# Altium schematic symbol library Headers.SchLib: 126 symbols (part 2 of 2)
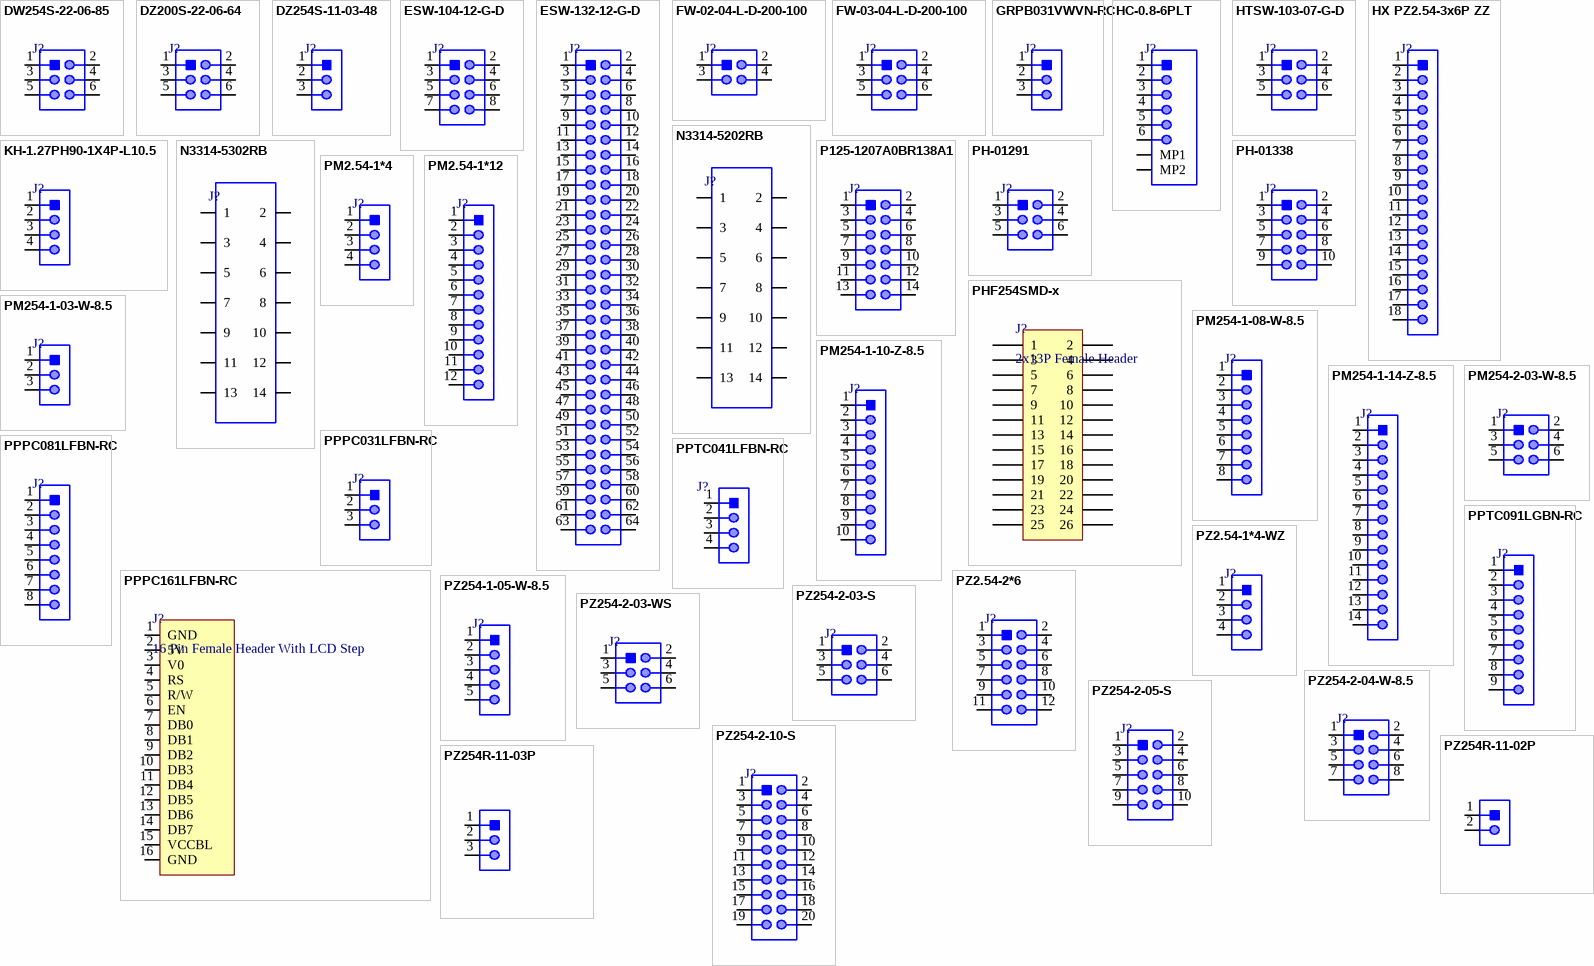
[diagram p4: symbols DW254S-22-06-85 to PZ254R-11-03P]

## PHF254SMD-x
designator J?, comment 2x13P Female Header
P=2.54mm Female Headers,SMD,ROHS; Manufacturer: RTLECS; Manufacturer Part Number: PHF254SMD-x; Value: Custom; Package: Custom; ComponentLink1Description: Aliexpress; ComponentLink1URL: https://vi.aliexpress.com/i/32798959899.html?gatewayAdapt=glo2vnm; Item Type: Header
footprint PHF254SMD-x_
pins: 1, 2, 3, 4, 5, 6, 7, 8, 9, 10, 11, 12, 13, 14, 15, 16, 17, 18, 19, 20, 21, 22, 23, 24, 25, 26

## PM2.54-1*4
designator J?
2mm 2.54mm Plugin 2.5A -40℃~+105℃ Straight 1x4P Top 8.5mm 4 Square Hole Plugin,P=2.54mm Female Headers ROHS; Manufacturer: ZHOURI; Manufacturer Part Number: PM2.54-1*4; Package: Plugin,P=2.54mm; LCSC Part Number: C5116530; Item Type: Female Header; ComponentLink1Description: LCSC; ComponentLink1URL: https://www.lcsc.com/product-detail/span-style-background-color-ff0-Female-span-Headers_ZHOURI-PM2-54-1-4_C5116530.html
footprint HDR1X4 Female
pins: 1, 2, 3, 4

## PM2.54-1*12
designator J?
2.54mm 2.54mm Plugin 2.5A 12P -40℃~+105℃ Straight 1x12P Top 8.5mm Square Hole Plugin,P=2.54mm Female Headers ROHS; Manufacturer: ZHOURI; Manufacturer Part Number: PM2.54-1*12; Package: Plugin,P=2.54mm; LCSC Part Number: C5224029; Item Type: Female Header; ComponentLink1Description: LCSC; ComponentLink1URL: https://www.lcsc.com/product-detail/span-style-background-color-ff0-Female-span-Headers_ZHOURI-PM2-54-1-12_C5224029.html
footprint HDR 1x12 TH (Female)
pins: 1, 2, 3, 4, 5, 6, 7, 8, 9, 10, 11, 12

## PM254-1-03-W-8.5
designator J?
2.54mm Plugin 3A Copper Alloy 3P -40℃~+105℃ 260℃@5S Right-Angle 1x3P side 8.5mm Square Holes Push-Pull,P=2.54mm Female Headers ROHS; Manufacturer: HCTL; Manufacturer Part Number: PM254-1-03-W-8.5; Package: Push-Pull,P=2.54mm; LCSC Part Number: C2897385; Item Type: Female Header; ComponentLink1Description: LCSC; ComponentLink1URL: *
footprint HDR 1x3 Female Right angle (2.54mm)
pins: 1, 2, 3

## PM254-1-08-W-8.5
designator J?
2.54mm Single Row 3A Copper Alloy 8P -40℃~+105℃ 260℃@5S Bend insert 1x8P Side 8.5mm Square Hole Push-Pull,P=2.54mm Female Headers ROHS; Manufacturer: HCTL; Manufacturer Part Number: PM254-1-08-W-8.5; Package: Push-Pull,P=2.54mm; LCSC Part Number: C2897390; Item Type: Headers; ComponentLink1Description: LCSC; ComponentLink1URL: https://www.lcsc.com/product-detail/Female-Headers_HCTL-PM254-1-08-W-8-5_C2897390.html
footprint PM254-1-08-W-8.5
pins: 1, 2, 3, 4, 5, 6, 7, 8

## PM254-1-10-Z-8.5
designator J?
2.54mm Single Row 3A Copper alloy 10P -40℃~+105℃ Direct Insert 1x10P 8.5mm Top Square Hole Plugin,P=2.54mm Female Headers ROHS; Manufacturer: HCTL; Manufacturer Part Number: PM254-1-10-Z-8.5; Package: Plugin,P=2.54mm; LCSC Part Number: C2897373; Item Type: Female Header; ComponentLink1Description: LCSC; ComponentLink1URL: https://www.lcsc.com/product-detail/Female-Headers_HCTL-PM254-1-10-Z-8-5_C2897373.html
footprint PM254-1-10-Z-8.5
pins: 1, 2, 3, 4, 5, 6, 7, 8, 9, 10

## PM254-1-14-Z-8.5
designator J?
2.54mm Single Row 3A Brass Alloy 14P -40℃~+105℃ 260℃@5S Direct Insert 1x14P 8.5mm Top Square Hole Plugin,P=2.54mm Female Headers ROHS; Manufacturer: HCTL; Manufacturer Part Number: PM254-1-14-Z-8.5; Package: Plugin,P=2.54mm; LCSC Part Number: C2897377; Item Type: Female Header; ComponentLink1Description: LCSC; ComponentLink1URL: https://www.lcsc.com/product-detail/Female-Headers_HCTL-PM254-1-14-Z-8-5_C2897377.html
footprint HDR 1x14 TH (Female)
pins: 1, 2, 3, 4, 5, 6, 7, 8, 9, 10, 11, 12, 13, 14

## PM254-2-03-W-8.5
designator J?
2.54mm 2.54mm 双排 3A Copper Alloy 6P -40℃~+105℃ 260℃@5S Right-Angle 2x3P side 8.5mm Square Holes Push-Pull,P=2.54mm Female Headers ROHS; Manufacturer: HCTL; Manufacturer Part Number: PM254-2-03-W-8.5; Package: Push-Pull,P=2.54mm; LCSC Part Number: C2897423; Item Type: Female Header; ComponentLink1Description: LCSC; ComponentLink1URL: https://www.lcsc.com/product-detail/Female-Headers_HCTL-PM254-2-03-W-8-5_C2897423.html
footprint HDR 2x3 right angle Female (2.54mm)
pins: 1, 2, 3, 4, 5, 6

## PPPC031LFBN-RC
designator J?
CONN HDR 3POS 0.1 GOLD PCB; Manufacturer: Sullins; Manufacturer Part Number: PPPC031LFBN-RC; Item Type: Connectors; Supplier: Digikey; Supplier Part Number: S7036-ND; RoHS: Yes; Stock: 27967; Pricing: 1=0.38, 10=0.33, 100=0.2721, 500=0.2366, 1000=0.1952, 5000=0.17154, 10000=0.169 (USD); ComponentLink1URL: https://media.digikey.com/pdf/Data%20Sheets/Sullins%20PDFs/Female_Headers.100_DS.pdf?src-supplier=Digikey; ComponentLink1Description: https://media.digikey.com/pdf/Data%20Sheets/Sullins%20PDFs/Female_Headers.100_DS.pdf?src-supplier=Digikey; ComponentLink2URL: http://www.sullinscorp.com/catalogs/78_Page80-81_HEADER_.100_2.54mm_FEMALE.pdf?src-supplier=Future+Electronics; ComponentLink2Description: http://www.sullinscorp.com/catalogs/78_Page80-81_HEADER_.100_2.54mm_FEMALE.pdf?src-supplier=Future+Electronics; ComponentLink3URL: https://datasheet.octopart.com/PPPC031LFBN-RC-Sullins-datasheet-41308905.pdf?src-supplier=Future+Electronics; ComponentLink3Description: https://datasheet.octopart.com/PPPC031LFBN-RC-Sullins-datasheet-41308905.pdf?src-supplier=Future+Electronics
footprint HDR1X3 (Female)
pins: 1, 2, 3

## PPPC081LFBN-RC
designator J?
CONN HDR 8POS 0.1 GOLD PCB; Manufacturer: Sullins; Manufacturer Part Number: PPPC081LFBN-RC; Item Type: Connectors; Number of Positions: 8; Connector Type: Header; Voltage Rating: 250V; Supplier: Digikey; Supplier Part Number: S7041-ND; RoHS: Yes; Stock: 34437; Pricing: 1=0.68, 10=0.594, 80=0.48975, 440=0.42589, 1000=0.35135, 5000=0.30876, 10000=0.3042 (USD); Mounting Technology: Through Hole; Contact Material: Bronze; Housing Material: Plastic; Contact Finish - Mating: GOLD; Insulation Color: Black; Insulation Material: Polyester; Contact Shape: Square; Min Operating Temperature: -40°C; Max Operating Temperature: 105°C; Number of Rows: 1; Packaging: Bulk; Termination: Solder; Contact Type: Female Socket; Fastening Type: Pull; Series: -; Length: 20.8mm; Width: 2.5mm; Height: 8.5mm; Lead Free: Lead Free; RoHS Compliant: Yes; Flammability Rating: UL94 V-0; ComponentLink1URL: https://media.digikey.com/pdf/Data%20Sheets/Sullins%20PDFs/Female_Headers.100_DS.pdf?src-supplier=Digikey; ComponentLink1Description: https://media.digikey.com/pdf/Data%20Sheets/Sullins%20PDFs/Female_Headers.100_DS.pdf?src-supplier=Digikey; ComponentLink2URL: http://www.sullinscorp.com/catalogs/101_Page80-81_HEADER_.100_2.54mm_FEMALE.pdf?src-supplier=Future+Electronics; ComponentLink2Description: http://www.sullinscorp.com/catalogs/101_Page80-81_HEADER_.100_2.54mm_FEMALE.pdf?src-supplier=Future+Electronics
footprint HDR1X8 Female (Connector; Header; 8 Position)
pins: 1, 2, 3, 4, 5, 6, 7, 8

## PPPC161LFBN-RC
designator J?, comment 16 Pin Female Header With LCD Step
CONN HDR 16POS 0.1 GOLD PCB; Manufacturer: Sullins; Manufacturer Part Number: PPPC161LFBN-RC; Number of Positions: 16; Connector Type: Header,Socket; Pitch: 0.1inch; Supplier 1: Digi-Key; Stock 1: 6865; Pricing 1: 1=1.02, 10=0.897, 100=0.7742, 500=0.63342, 1000=0.56304, 5000=0.5083 (USD); Mount: Through Hole; Color: Black; Contact Plating: Gold; Contact Material: Bronze; Housing Material: Plastic; Package Quantity: 1000; Number of Rows: 1; Packaging: Bulk; Termination: Solder; Length: 41.1mm; Height: 8.5mm; Width: 2.5mm; Lead Free: Lead Free; Supplier Part Number 1: S7049-ND; LCSC Part Number: C3322257; ComponentLink1Description: LCSC; ComponentLink1URL: https://www.lcsc.com/product-detail/Female-Headers_Sullins-Connector-Solutions-PPPC161LFBN-RC_C3322257.html
footprint PPPC161LFBN-RC_ (CONN HDR 16POS 0.1 GOLD PCB)
pins: 1 GND, 2 5V, 3 V0, 4 RS, 5 R/W, 6 EN, 7 DB0, 8 DB1, 9 DB2, 10 DB3, 11 DB4, 12 DB5, 13 DB6, 14 DB7, 15 VCCBL, 16 GND

## PPTC041LFBN-RC
designator J?
CONN HEADER FEMALE 4POS .1 TIN; Manufacturer: Sullins; Manufacturer Part Number: PPTC041LFBN-RC; Number of Positions: 4; Voltage Rating: 250V; Pitch: 2.54mm; Supplier 1: Future Electronics; RoHS: Yes; Category: Connectors; Stock 1: 915; Pricing 1: 1=0.28500, 150=0.27500, 400=0.26500, 1500=0.25500, 4000=0.23500 (USD); Mounting Technology: Through Hole; Contact Material: Bronze; Housing Material: Plastic; Contact Finish - Mating: TIN; Insulation Color: Black; Insulation Material: Polyester; Contact Shape: Square; Min Operating Temperature: -40°C; Max Operating Temperature: 105°C; Number of Rows: 1; Packaging: Tray; Termination: Solder; Connector Type: Header; Contact Type: Female Socket; Fastening Type: Pull; Series: -; Length: 10.7mm; Width: 2.5mm; Height: 8.5mm; Lead Free: Lead Free; RoHS Compliant: Yes; Flammability Rating: UL94 V-0; ComponentLink1URL: https://media.digikey.com/pdf/Data%20Sheets/Sullins%20PDFs/Female_Headers.100_DS.pdf?src-supplier=Digi-Key; ComponentLink1Description: https://media.digikey.com/pdf/Data%20Sheets/Sullins%20PDFs/Female_Headers.100_DS.pdf?src-supplier=Digi-Key; ComponentLink2URL: http://www.sullinscorp.com/catalogs/78_Page80-81_HEADER_.100_2.54mm_FEMALE.pdf?src-supplier=Future+Electronics; ComponentLink2Description: http://www.sullinscorp.com/catalogs/78_Page80-81_HEADER_.100_2.54mm_FEMALE.pdf?src-supplier=Future+Electronics; Supplier Part Number 1: 7137813; LCSC Part Number: C3319639; Item Type: Header
footprint HDR1X4 Female
pins: 1, 2, 3, 4

## PPTC091LGBN-RC
designator J?
CONN HDR 9POS 0.1 TIN PCB R/A; Manufacturer: Sullins; Manufacturer Part Number: PPTC091LGBN-RC; Number of Positions: 9; Connector Type: Header; Voltage Rating: 250V; Item Type: Female Header R/A; Supplier: Digikey; Supplier Part Number: S5445-ND; RoHS: Yes; Category: Headers and Wire Housings; Stock: 254; Pricing: 1=0.74, 10=0.624, 80=0.5605, 440=0.45864, 1000=0.40768, 5000=0.364 (USD); Mounting Technology: Through Hole; Contact Material: Bronze; Housing Color: Black; Housing Material: Plastic; Contact Finish - Mating: TIN; Insulation Color: Black; Insulation Material: Polyester; Contact Shape: Square; Min Operating Temperature: -40°C; Max Operating Temperature: 105°C; Number of Rows: 1; Packaging: Tray; Termination: Solder; Contact Type: Female Socket; Fastening Type: Pull; Series: -; Length: 23.4mm; Width: 8.5mm; Height: 2.4mm; Lead Free: Lead Free; RoHS Compliant: Yes; Flammability Rating: UL94 V-0; ComponentLink1URL: https://media.digikey.com/pdf/Data%20Sheets/Sullins%20PDFs/Female_Headers.100_DS.pdf?src-supplier=Digikey; ComponentLink1Description: https://media.digikey.com/pdf/Data%20Sheets/Sullins%20PDFs/Female_Headers.100_DS.pdf?src-supplier=Digikey
footprint HDR 1x9 Female R/A
pins: 1, 2, 3, 4, 5, 6, 7, 8, 9

## PZ2.54-1*4-WZ
designator J?
Gold Right-Angle 4P 2.54mm Plugin 1x4P Push-Pull,P=2.54mm Pin Headers ROHS; Manufacturer: ZHOURI; Manufacturer Part Number: PZ2.54-1*4-WZ; Item Type: Header; Package: Push-Pull,P=2.54mm; LCSC Part Number: C5224015; ComponentLink1Description: LCSC; ComponentLink1URL: https://www.lcsc.com/product-detail/Pin-Headers_ZHOURI-PZ2-54-1-4-WZ_C5224015.html
footprint PZ2.54-1*4-WZ
pins: 1, 2, 3, 4

## PZ2.54-2*6
designator J?
Gold Straight 12P 2.54mm 双排 2x6P Plugin,P=2.54mm Pin Headers ROHS; Manufacturer: ZHOURI; Manufacturer Part Number: PZ2.54-2*6; Item Type: Header; Package: Plugin,P=2.54mm; LCSC Part Number: C5224012; ComponentLink1Description: LCSC; ComponentLink1URL: https://www.lcsc.com/product-detail/span-style-background-color-ff0-Pin-span-Headers_ZHOURI-PZ2-54-2-6_C5224012.html
footprint HDR 2x6 Straight (2.54mm)
pins: 1, 2, 3, 4, 5, 6, 7, 8, 9, 10, 11, 12

## PZ254-1-05-W-8.5
designator J?
3A Right-Angle Square Pins 2.5mm 260℃@10S 5P 6mm -40℃~+105℃ 2.54mm Plugin Black 1x5P Push-Pull,P=2.54mm Pin Headers ROHS; Manufacturer: HCTL; Manufacturer Part Number: PZ254-1-05-W-8.5; Package: Push-Pull,P=2.54mm; LCSC Part Number: C2894947; Item Type: Pin Headers; ComponentLink1Description: LCSC; ComponentLink1URL: https://www.lcsc.com/product-detail/Pin-Headers_HCTL-PZ254-1-05-W-8-5_C2894947.html
footprint HDR1X5 (R\A) (Connector; Header; 5 Position)
pins: 1, 2, 3, 4, 5

## PZ254-2-03-S
designator J?
250V 3A Standing paste Policy 2.5mm 6mm 6P -40℃~+105℃ 2.54mm Double Row Black 2.54mm 2x3P SMD,P=2.54mm Pin Headers ROHS; Manufacturer: HCTL; Manufacturer Part Number: PZ254-2-03-S; Item Type: Header; Package: SMD,P=2.54mm; LCSC Part Number: C3294461; ComponentLink1Description: LCSC; ComponentLink1URL: https://www.lcsc.com/product-detail/Pin-Headers_HCTL-PZ254-2-03-S_C3294461.html
footprint HDR 2x3 Male SMD 2.54mm
pins: 1, 2, 3, 4, 5, 6

## PZ254-2-03-WS
designator J?
3A Surface Mount，Right Angle Square Pins 2.5mm 260℃@10S 6mm 6P -40℃~+105℃ 2.54mm 双排 Black 2.54mm 2x3P SMD,P=2.54mm Pin Headers ROHS; Manufacturer: HCTL; Manufacturer Part Number: PZ254-2-03-WS; Item Type: Header; Package: SMD,P=2.54mm; LCSC Part Number: C5149353; ComponentLink1Description: LCSC; ComponentLink1URL: https://www.lcsc.com/product-detail/Pin-Headers_HCTL-PZ254-2-03-WS_C5149353.html
footprint PZ254-2-03-WS
pins: 1, 2, 3, 4, 5, 6

## PZ254-2-04-W-8.5
designator J?
3A Right-Angle Square Pins 2.5mm 260℃@10S 8P 6mm -40℃~+105℃ 2.54mm 双排 Black 2.54mm 2x4P Push-Pull,P=2.54mm Pin Headers ROHS; Manufacturer: HCTL; Manufacturer Part Number: PZ254-2-04-W-8.5; LCSC Part No: C2894984; ComponentLink1URL: https://www.lcsc.com/product-detail/Pin-Headers_HCTL-PZ254-2-04-W-8-5_C2894984.html; ComponentLink1Description: LCSC; Item Type: Push-Pull,P=2.54mm
footprint PZ254-2-04-W-8.5.
pins: 1, 2, 3, 4, 5, 6, 7, 8

## PZ254-2-05-S
designator J?
250V 3A Brick nogging Square Pins 2.5mm 260℃@5S 6mm 10P -40℃~+105℃ 2.54mm 双排 Black 2.54mm 2x5P SMD,P=2.54mm Pin Headers ROHS; Manufacturer: HCTL; Manufacturer Part Number: PZ254-2-05-S; Item Type: Male Header; LCSC Part Number: C3294463
footprint PZ254-2-05-S
pins: 1, 2, 3, 4, 5, 6, 7, 8, 9, 10

## PZ254-2-10-S
designator J?
250V 3A Brick nogging Square Pins 2.5mm 260℃@5S 6mm 20P -40℃~+105℃ 2.54mm 双排 Black 2.54mm 2x10P SMD,P=2.54mm Pin Headers ROHS; Manufacturer: HCTL; Manufacturer Part Number: PZ254-2-10-S; Item Type: Male Header; LCSC Part Number: C3294468
footprint PZ254-2-10-S
pins: 1, 2, 3, 4, 5, 6, 7, 8, 9, 10, 11, 12, 13, 14, 15, 16, 17, 18, 19, 20

## PZ254R-11-02P
designator J?
Right-Angle Square Pins 2.5mm 2P 6mm -40℃~+105℃ 2.54mm Plugin Black Brass 1x2P Push-Pull,P=2.54mm Pin Headers ROHS; Manufacturer: XFCN; Manufacturer Part Number: PZ254R-11-02P; Item Type: R/A Male Header; Package: Push-Pull,P=2.54mm; LCSC Part Number: C492410; ComponentLink1Description: LCSC; ComponentLink1URL: https://www.lcsc.com/product-detail/Pin-Headers_XFCN-PZ254R-11-02P_C492410.html
footprint HDR1X2 (R/A Male) (CONN HEADER VERT 2POS 2.54MM)
pins: 1, 2

## PZ254R-11-03P
designator J?
Right-Angle Square Pins 2.5mm 3P 6mm -40℃~+105℃ 2.54mm Plugin Black Brass 1x3P Push-Pull,P=2.54mm Pin Headers ROHS; Manufacturer: XFCN; Manufacturer Part Number: PZ254R-11-03P; Item Type: R/A Male Header; Package: Push-Pull,P=2.54mm; LCSC Part Number: C492411; ComponentLink1Description: LCSC; ComponentLink1URL: https://www.lcsc.com/product-detail/Pin-Headers_XFCN-PZ254R-11-03P_C492411.html
footprint HDR1X3 (R/A Male) (Connector; Header; 3 Position)
pins: 1, 2, 3

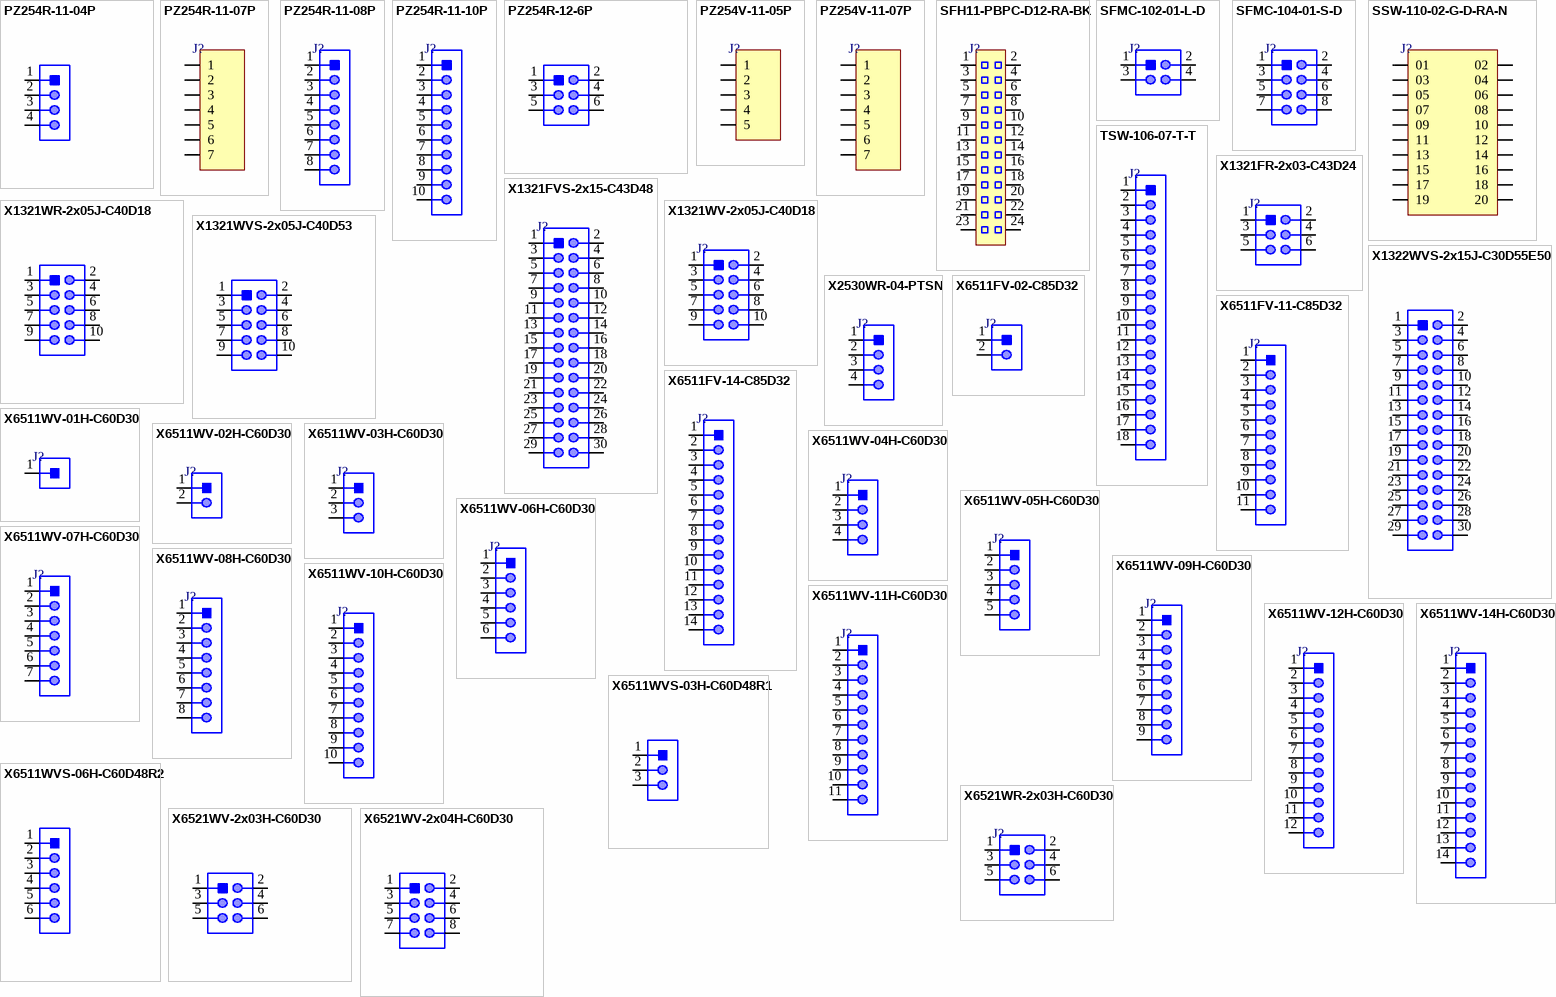
[diagram p2: symbols PZ254R-11-04P to X6521WV-2x04H-C60D30]

## PZ254R-11-04P
designator J?
Right-Angle Square Pins 2.5mm 4P 6mm -40℃~+105℃ 2.54mm Plugin Black Brass 1x4P Push-Pull,P=2.54mm Pin Headers ROHS; Manufacturer: XFCN; Manufacturer Part Number: PZ254R-11-04P; Item Type: R/A Male Header; Package: Push-Pull,P=2.54mm; LCSC Part Number: C492412; ComponentLink1Description: LCSC; ComponentLink1URL: https://www.lcsc.com/product-detail/Pin-Headers_XFCN-PZ254R-11-04P_C492412.html
footprint HDR1X4 (R/A Male) (Connector; Header; 4 Position)
pins: 1, 2, 3, 4

## PZ254R-11-07P
designator J?
Shrouded Square Pins 2.5mm 6mm -40℃~+105℃ 1 7 2.54mm Black Brass 1x7P Plugin,P=2.54mm Pin Headers ROHS; Manufacturer: XFCN; Manufacturer Part Number: PZ254R-11-07P; Footprint: Custom; ComponentLink1Description: LCSC; ComponentLink1URL: https://lcsc.com/product-detail/Pin-Headers_XFCN-PZ254R-11-07P_C492415.html; LCSC Part Number: C492415
footprint HDR1X7H_ (Connector; Header; 7 Position; Right Angle)
pins: 1, 2, 3, 4, 5, 6, 7

## PZ254R-11-08P
designator J?
Right-Angle Square Pins 2.5mm 8P 6mm -40℃~+105℃ 2.54mm Plugin Black Brass 1x8P Push-Pull,P=2.54mm Pin Headers ROHS; Manufacturer: XFCN; Manufacturer Part Number: PZ254R-11-08P; Footprint: Custom; ComponentLink1Description: LCSC; ComponentLink1URL: https://www.lcsc.com/product-detail/Pin-Headers_XFCN-PZ254R-11-08P_C492416.html; LCSC Part Number: C492416
footprint HDR 1x8 Male Right Angle
pins: 1, 2, 3, 4, 5, 6, 7, 8

## PZ254R-11-10P
designator J?
Bend-in Policy 2.5mm 10P 6mm -40℃~+105℃ 2.54mm Single Row Black Brass 1x10P Push-Pull,P=2.54mm Pin Headers ROHS; Manufacturer: XFCN; Manufacturer Part Number: PZ254R-11-10P; Footprint: Custom; ComponentLink1Description: LCSC; ComponentLink1URL: https://www.lcsc.com/product-detail/Pin-Headers_XFCN-PZ254R-11-10P_C492418.html; LCSC Part Number: C492418
footprint PZ254R-11-10P
pins: 1, 2, 3, 4, 5, 6, 7, 8, 9, 10

## PZ254R-12-6P
designator J?
Right-Angle Square Pins 2.5mm 6P 6mm -40℃~+105℃ 2.54mm 双排 Black Brass 2x3P 2.54mm Push-Pull,P=2.54mm Pin Headers ROHS; Manufacturer: XFCN; Manufacturer Part Number: PZ254R-12-6P; Item Type: R/A Male Header; Package: Push-Pull,P=2.54mm; LCSC Part Number: C492431; ComponentLink1Description: LCSC; ComponentLink1URL: https://www.lcsc.com/product-detail/Pin-Headers_XFCN-PZ254R-12-6P_C492431.html
footprint HDR2X3 (R/A Male)
pins: 1, 2, 3, 4, 5, 6

## PZ254V-11-05P
designator J?
Straight Square Pins 2.5mm 6mm -40℃~+105℃ 3mm 5 2.54mm 单排 Black Brass 1x5P Plugin,P=2.54mm Pin Headers ROHS; Manufacturer: XFCN; Manufacturer Part Number: PZ254V-11-05P; Item Type: Header; Package: Plugin,P=2.54mm; LCSC Part Number: C492404; ComponentLink1Description: LCSC; ComponentLink1URL: https://www.lcsc.com/product-detail/Pin-Headers_XFCN-PZ254V-11-05P_C492404.html
footprint HDR1X5_ (Connector; Header; 5 Position)
pins: 1, 2, 3, 4, 5

## PZ254V-11-07P
designator J?
Straight Square Pins 2.5mm 7P 6mm -40℃~+105℃ 3mm 2.54mm Plugin Black Brass 1x7P Plugin,P=2.54mm Pin Headers ROHS; Manufacturer: XFCN; Manufacturer Part Number: PZ254V-11-07P; Item Type: Male Header; Package: Plugin,P=2.54mm; LCSC Part Number: C492406; ComponentLink1Description: LCSC; ComponentLink1URL: https://www.lcsc.com/product-detail/span-style-background-color-ff0-Pin-span-Headers_XFCN-PZ254V-11-07P_C492406.html
footprint HDR1X7 (Connector; Header; 7 Position)
pins: 1, 2, 3, 4, 5, 6, 7

## SFH11-PBPC-D12-RA-BK
designator J?
CONN HDR 24POS 0.1 GOLD PCB R/A; Manufacturer: Sullins; Manufacturer Part Number: SFH11-PBPC-D12-RA-BK; Item Type: Connectors; Number of Positions: 24; Connector Type: Header; Pitch: 0.1inch; Supplier: Digikey; RoHS: Yes; Pricing: 1000=0.8853 (USD); Mounting Technology: Through Hole; Color: Black; Contact Plating: Gold; Package Quantity: 1000; Packaging: Tray; Number of Rows: 2; Termination: Solder; Series: SFH11; Contact Type: Female Socket; Row Spacing: 0.1inch; RoHS Compliant: Yes; ComponentLink1URL: http://sullinscorp.com/catalogs/147_PAGE119_.100_SFH11_SERIES_FEMALE_HDR_ST_RA.pdf?src-supplier=Digikey; ComponentLink1Description: http://sullinscorp.com/catalogs/147_PAGE119_.100_SFH11_SERIES_FEMALE_HDR_ST_RA.pdf?src-supplier=Digikey
footprint SFH11-PBPC-D12-RA-BK
pins: 1, 2, 3, 4, 5, 6, 7, 8, 9, 10, 11, 12, 13, 14, 15, 16, 17, 18, 19, 20, 21, 22, 23, 24

## SFMC-102-01-L-D
designator J?
CONN RCPT 4POS 0.05 GOLD PCB; Manufacturer: Samtec; Manufacturer Part Number: SFMC-102-01-L-D; Item Type: Connectors; Number of Contacts: 4; Gender: Female; Connector Type: Receptacle; Pitch: 1.27mm; Supplier: Mouser; Supplier Part Number: 200-SFMC10201LD; RoHS: Yes; Stock: 401; Pricing: 1=1.58, 10=1.58, 50=1.27, 100=1.25, 1000=0.79, 10000=0.6 (USD); Mounting Technology: Through Hole; Contact Plating: Gold; Contact Material: Copper; Contact Finish - Mating: GOLD; Insulation Color: Black; Insulation Material: Polymer; Contact Shape: Square; Min Operating Temperature: -55°C; Max Operating Temperature: 125°C; Packaging: Bulk; Number of Rows: 2; Termination: Solder; Fastening Type: Pull; Series: Tiger Eye™ SFMC; Contact Type: Female Socket; Number of Positions: 4; Radiation Hardening: No; RoHS Compliant: Yes; Flammability Rating: UL94 V-0; ComponentLink1URL: https://datasheet.ciiva.com/10179/sfmc-10179325.pdf?src-supplier=Avnet; ComponentLink1Description: https://datasheet.ciiva.com/10179/sfmc-10179325.pdf?src-supplier=Avnet
footprint SFMC-102-01-L-D
pins: 1, 2, 3, 4

## SFMC-104-01-S-D
designator J?
CONN RCPT 8POS 0.05 GOLD PCB; Manufacturer: Samtec; Manufacturer Part Number: SFMC-104-01-S-D; Item Type: Connectors; Supplier: Rs; Supplier Part Number: 1592292; RoHS: Yes; Stock: 3; ComponentLink1URL: https://datasheet.ciiva.com/10157/sfmc-10157213.pdf?src-supplier=Avnet; ComponentLink1Description: https://datasheet.ciiva.com/10157/sfmc-10157213.pdf?src-supplier=Avnet
footprint SFMC-104-01-S-D
pins: 1, 2, 3, 4, 5, 6, 7, 8

## SSW-110-02-G-D-RA-N
designator J?
CONN RCPT 20POS 0.1 GOLD PCB R/A; Manufacturer: Samtec; Manufacturer Part Number: SSW-110-02-G-D-RA-N; Item Type: Connectors; Gender: 30Gender; Supplier: Digikey; RoHS: Yes; Stock: 310; Pricing: 1=3.59, 25=3.5052, 50=3.4236, 100=3.2605, 500=2.43324, 1000=2.11363, 2500=1.908 (USD); ComponentLink1URL: ftp://ftp.samtec.com/webfiles/PDF/SSQ_TH.PDF?src-supplier=Avnet; ComponentLink1Description: ftp://ftp.samtec.com/webfiles/PDF/SSQ_TH.PDF?src-supplier=Avnet; ComponentLink2URL: https://datasheet.octopart.com/SSW-110-02-G-D-RA-N-Samtec-datasheet-160481827.pdf?src-supplier=Toby+Electronics; ComponentLink2Description: https://datasheet.octopart.com/SSW-110-02-G-D-RA-N-Samtec-datasheet-160481827.pdf?src-supplier=Toby+Electronics; ComponentLink3URL: https://datasheet.octopart.com/SSW-110-02-G-D-RA-N-Samtec-datasheet-118235309.pdf?src-supplier=Sager+Electronics; ComponentLink3Description: https://datasheet.octopart.com/SSW-110-02-G-D-RA-N-Samtec-datasheet-118235309.pdf?src-supplier=Sager+Electronics; ComponentLink4URL: https://datasheet.octopart.com/SSW-110-02-G-D-RA-N-Samtec-datasheet-184263327.pdf?src-supplier=Master+Electronics; ComponentLink4Description: https://datasheet.octopart.com/SSW-110-02-G-D-RA-N-Samtec-datasheet-184263327.pdf?src-supplier=Master+Electronics
footprint SSW-110-02-G-D-RA-N
pins: 01, 02, 03, 04, 05, 06, 07, 08, 09, 10, 11, 12, 13, 14, 15, 16, 17, 18, 19, 20

## TSW-106-07-T-T
designator J?
CONN HEADER VERT 18POS 2.54MM; Manufacturer: Samtec; Manufacturer Part Number: TSW-106-07-T-T; Item Type: Connectors; Supplier: Arrow Electronics; LCSC Part Number: C5967361; RoHS: Yes; Stock: 1529; ComponentLink1URL: http://www.samtec.com/ftppub/pdf/htsw_th.pdf?src-supplier=Avnet; ComponentLink1Description: http://www.samtec.com/ftppub/pdf/htsw_th.pdf?src-supplier=Avnet; ComponentLink2URL: https://datasheet.octopart.com/TSW-106-07-T-T-Samtec-datasheet-97325576.pdf?src-supplier=Sager+Electronics; ComponentLink2Description: https://datasheet.octopart.com/TSW-106-07-T-T-Samtec-datasheet-97325576.pdf?src-supplier=Sager+Electronics
footprint TSW-106-07-T-T
pins: 1, 2, 3, 4, 5, 6, 7, 8, 9, 10, 11, 12, 13, 14, 15, 16, 17, 18

## X1321FR-2x03-C43D24
designator J?
1.27mm 1.27mm Double Row Gold 1A 6P Brass -40℃~+105℃ 250V Bend-in 2x3P Side 4.3mm Square Hole Push-Pull,P=1.27mm Female Headers ROHS; Manufacturer: XKB Connection; Manufacturer Part Number: X1321FR-2x03-C43D24; Item Type: Female Header R/A; Package: Push-Pull,P=1.27mm; LCSC Part Number: C2881889; ComponentLink1Description: LCSC; ComponentLink1URL: https://www.lcsc.com/product-detail/Female-Headers_XKB-Connection-X1321FR-2x03-C43D24_C2881889.html
footprint HDR 2x3 right angle Female (1.27mm)
pins: 1, 2, 3, 4, 5, 6

## X1321FVS-2x15-C43D48
designator J?
1.27mm 双排 Gold 1A 30P Brass -40℃~+105℃ 250V 260℃ Brick nogging 2x15P 4.3mm Top Square Holes SMD,P=1.27mm Female Headers ROHS; Manufacturer: XKB Connection; Manufacturer Part Number: X1321FVS-2x15-C43D48; Package: SMD,P=1.27mm; LCSC Part Number: C2689674; Item Type: Female Header; ComponentLink1Description: LCSC; ComponentLink1URL: https://www.lcsc.com/product-detail/Female-Headers_XKB-Connection-X1321FVS-2x15-C43D48_C2689674.html
footprint X1321FVS-2x15-C43D48
pins: 1, 2, 3, 4, 5, 6, 7, 8, 9, 10, 11, 12, 13, 14, 15, 16, 17, 18, 19, 20, 21, 22, 23, 24, 25, 26, 27, 28, 29, 30

## X1321WR-2x05J-C40D18
designator J?
Gold 250V 1A Right-Angle Square Pins 1mm 10P 260℃ 4mm -40℃~+105℃ 1.27mm 双排 Black Brass 1.27mm 2x5P Push-Pull,P=1.27mm Pin Headers ROHS; Manufacturer: XKB; Manufacturer Part Number: X1321WR-2x05J-C40D18; Item Type: Male Pin Header; Package: Push-Pull,P=1.27mm; LCSC Part Number: C2881825; ComponentLink1Description: LCSC
footprint X1321WR-2x05J-C40D18
pins: 1, 2, 3, 4, 5, 6, 7, 8, 9, 10

## X1321WV-2x05J-C40D18
designator J?
Gold 250V 3A Pin Header 1mm 10P -40℃~+105℃ 1.27mm Brass Black 2 1.27mm 2x5P Through Hole,P=1.27mm Pin Headers ROHS; Manufacturer: XKB Connection; Manufacturer Part Number: X1321WV-2x05J-C40D18; Package: Through Hole,P=1.27mm; LCSC Part Number: C5243450; Item Type: Header; ComponentLink1Description: LCSC; ComponentLink1URL: https://lcsc.com/product-detail/Pin-Headers_XKB-Connection-X1321WV-2x05J-C40D18_C5243450.html
footprint X1321WV-2x05J-C40D18
pins: 1, 2, 3, 4, 5, 6, 7, 8, 9, 10

## X1321WVS-2x05J-C40D53
designator J?
Gold 250V 1A Brick nogging Square Pins 1mm 10P 260℃ 4mm -40℃~+105℃ 1.27mm 双排 Black Brass 2x5P SMD,P=1.27mm Pin Headers ROHS; Manufacturer: XKB Connectivity; Manufacturer Part Number: X1321WVS-2x05J-C40D53; Item Type: Male Header; Package: SMD,P=1.27mm; LCSC Part Number: C2881910; ComponentLink1Description: LCSC; ComponentLink1URL: https://www.lcsc.com/product-detail/Pin-Headers_XKB-Connectivity-X1321WVS-2x05J-C40D53_C2881910.html
footprint X1321WVS-2x05J-C40D53
pins: 1, 2, 3, 4, 5, 6, 7, 8, 9, 10

## X1322WVS-2x15J-C30D55E50
designator J?
Gold 250V 1A Square Pins 1mm 30P 260℃ 3mm -40℃~+105℃ 5.5mm 1.27mm 双排 Black Brass 1.27mm 2x15P SMD,P=1.27mm Pin Headers ROHS; Manufacturer: XKB Connectivity; Manufacturer Part Number: X1322WVS-2x15J-C30D55E50; Item Type: Male Header; Package: SMD,P=1.27mm; LCSC Part Number: C2689746; ComponentLink1Description: LCSC; ComponentLink1URL: https://www.lcsc.com/product-detail/Pin-Headers_XKB-Connection-X1322WVS-2x15J-C30D55E50_C2689746.html
footprint X1322WVS-2x15J-C30D55E50
pins: 1, 2, 3, 4, 5, 6, 7, 8, 9, 10, 11, 12, 13, 14, 15, 16, 17, 18, 19, 20, 21, 22, 23, 24, 25, 26, 27, 28, 29, 30

## X2530WR-04-PTSN
designator J?
1x4P 4P 1 Tin 2.54mm 2.54mm 4 3A Brass Right-Angle Push-Pull,P=2.54mm Wire To Board Connector ROHS; Manufacturer: XKB Connection; Manufacturer Part Number: X2530WR-04-PTSN; Package: Push-Pull,P=2.54mm; LCSC Part Number: C400345; Item Type: Wire To Board Connector; ComponentLink1Description: LCSC; ComponentLink1URL: https://www.lcsc.com/product-detail/Wire-To-Board-Connector_XKB-Connection-X2530WR-04-PTSN_C400345.html
footprint X2530WR-04-PTSN
pins: 1, 2, 3, 4

## X6511FV-02-C85D32
designator J?
2.54mm Single Row Gold 3A 2P Brass -40℃~+105℃ 250V 260℃ Direct Insert 1x2P 8.5mm Top Square Hole Plugin,P=2.54mm Female Headers ROHS; Manufacturer: XKB Connectivity; Manufacturer Part Number: X6511FV-02-C85D32; Supplier: LCSC; LCSC Part Number: C718243; RoHS: No; Item Type: Female Header
footprint HDR1X2 (Female)
pins: 1, 2

## X6511FV-11-C85D32
designator J?
2.54mm Single Row Gold 3A 11P Brass -40℃~+105℃ 250V 260℃ Direct Insert 1x11P 8.5mm Top Square Hole Plugin,P=2.54mm Female Headers ROHS; Manufacturer: XKB Connectivity; Manufacturer Part Number: X6511FV-11-C85D32; Supplier: LCSC; LCSC Part Number: C2883728; RoHS: No; Item Type: Female Header; ComponentLink1Description: LCSC; ComponentLink1URL: https://www.lcsc.com/product-detail/Female-Headers_XKB-Connection-X6511FV-11-C85D32_C2883728.html
footprint HDR 1x11 TH (Female)
pins: 1, 2, 3, 4, 5, 6, 7, 8, 9, 10, 11

## X6511FV-14-C85D32
designator J?
2.54mm Single Row Gold 3A 14P Brass -40℃~+105℃ 250V 260℃ Direct Insert 1x14P 8.5mm Top Square Hole Plugin,P=2.54mm Female Headers ROHS; Manufacturer: XKB Connectivity; Manufacturer Part Number: X6511FV-14-C85D32; Item Type: Header; LCSC Part Number: C2883731
footprint HDR 1x14 TH (Female)
pins: 1, 2, 3, 4, 5, 6, 7, 8, 9, 10, 11, 12, 13, 14

## X6511WV-01H-C60D30
designator J?
Gold 250V 3A Square Pins 2.5mm 1P 260℃ 6mm -40℃~+105℃ 3mm 2.54mm Brass Black Plugin 2.54mm 1x1P Plugin,P=2.54mm Pin Headers ROHS; Manufacturer: XKB; Manufacturer Part Number: X6511WV-01H-C60D30; Item Type: Male Header; Package: Plugin,P=2.54mm; LCSC Part Number: C5242194; ComponentLink1Description: LCSC; ComponentLink1URL: https://www.lcsc.com/product-detail/Pin-Headers_XKB-Connection-X6511WV-01H-C60D30_C5242194.html
footprint HDR 1x1 TH Male
pins: 1

## X6511WV-02H-C60D30
designator J?
Gold 250V 3A Straight Square Pins 2.5mm 2P 260℃ 6mm -40℃~+105℃ 3mm 2.54mm Plugin Black Brass 1x2P Plugin,P=2.54mm Pin Headers ROHS; Manufacturer: XKB; Manufacturer Part Number: X6511WV-02H-C60D30; Item Type: Male Header; Package: Plugin,P=2.54mm; LCSC Part Number: C706874; ComponentLink1Description: LCSC; ComponentLink1URL: https://www.lcsc.com/product-detail/Pin-Headers_XKB-Connectivity-X6511WV-02H-C60D30_C706874.html
footprint HDR1X2_ (CONN HEADER VERT 2POS 2.54MM)
pins: 1, 2

## X6511WV-03H-C60D30
designator J?
Gold 250V 3A Straight Square Pins 2.5mm 3P 260℃ 6mm -40℃~+105℃ 3mm 2.54mm Plugin Black Brass 1x3P Plugin,P=2.54mm Pin Headers ROHS; Manufacturer: XKB; Manufacturer Part Number: X6511WV-03H-C60D30; Item Type: Male Header; Package: Plugin,P=2.54mm; LCSC Part Number: C706875; ComponentLink1Description: LCSC; ComponentLink1URL: https://www.lcsc.com/product-detail/Pin-Headers_XKB-Connectivity-X6511WV-03H-C60D30_C706875.html
footprint HDR1X3_ (Connector; Header; 3 Position)
pins: 1, 2, 3

## X6511WV-04H-C60D30
designator J?
Gold 250V 3A Straight Square Pins 2.5mm 4P 260℃ 6mm -40℃~+105℃ 3mm 2.54mm Plugin Black Brass 1x4P Plugin,P=2.54mm Pin Headers ROHS; Manufacturer: XKB; Manufacturer Part Number: X6511WV-04H-C60D30; Item Type: Male Header; ComponentLink1Description: LCSC; ComponentLink1URL: https://www.lcsc.com/product-detail/Pin-Headers_XKB-Connectivity-X6511WV-04H-C60D30_C706876.html; Package: Plugin,P=2.54mm; LCSC Part Number: C706876
footprint HDR1X4_ (Connector; Header; 4 Position)
pins: 1, 2, 3, 4

## X6511WV-05H-C60D30
designator J?
Gold 250V 3A Straight Square Pins 2.5mm 5P 260℃ 6mm -40℃~+105℃ 3mm 2.54mm Plugin Black Brass 1x5P Plugin,P=2.54mm Pin Headers ROHS; Manufacturer: XKB; Manufacturer Part Number: X6511WV-05H-C60D30; Item Type: Male Header; ComponentLink1Description: LCSC; ComponentLink1URL: https://www.lcsc.com/product-detail/Pin-Headers_XKB-Connectivity-X6511WV-05H-C60D30_C706877.html; Package: Plugin,P=2.54mm; LCSC Part Number: C706877
footprint HDR1X5_ (Connector; Header; 5 Position)
pins: 1, 2, 3, 4, 5

## X6511WV-06H-C60D30
designator J?
Gold 250V 3A Straight Square Pins 2.5mm 6P 260℃ 6mm -40℃~+105℃ 3mm 2.54mm Plugin Black Brass 1x6P Plugin,P=2.54mm Pin Headers ROHS; Manufacturer: XKB; Manufacturer Part Number: X6511WV-06H-C60D30; Item Type: Male Header; Package: Plugin,P=2.54mm; LCSC Part Number: C706878; ComponentLink1Description: LCSC; ComponentLink1URL: https://www.lcsc.com/product-detail/Pin-Headers_XKB-Connectivity-X6511WV-06H-C60D30_C706878.html
footprint HDR1X6_ (Connector; Header; 6 Position)
pins: 1, 2, 3, 4, 5, 6

## X6511WV-07H-C60D30
designator J?
Gold 250V 3A Straight Square Pins 2.5mm 7P 260℃ 6mm -40℃~+105℃ 3mm 2.54mm Plugin Black Brass 1x7P Plugin,P=2.54mm Pin Headers ROHS; Manufacturer: XKB; Manufacturer Part Number: X6511WV-07H-C60D30; Item Type: Male Header; Package: Plugin,P=2.54mm; LCSC Part Number: C706879; ComponentLink1Description: LCSC; ComponentLink1URL: https://www.lcsc.com/product-detail/Pin-Headers_XKB-Connectivity-X6511WV-07H-C60D30_C706879.html
footprint HDR1X7 (Connector; Header; 7 Position)
pins: 1, 2, 3, 4, 5, 6, 7

## X6511WV-08H-C60D30
designator J?
Gold 250V 3A Square Pins 2.5mm 8P 260℃ 6mm -40℃~+105℃ 3mm 2.54mm Plugin Black Brass 2.54mm 1x8P Plugin,P=2.54mm Pin Headers ROHS; Manufacturer: XKB; Manufacturer Part Number: X6511WV-08H-C60D30; Item Type: Male Header; Package: Plugin,P=2.54mm; LCSC Part Number: C706880; ComponentLink1Description: LCSC; ComponentLink1URL: https://www.lcsc.com/product-detail/Pin-Headers_XKB-Connection-X6511WV-08H-C60D30_C706880.html
footprint HDR 1x8 TH male
pins: 1, 2, 3, 4, 5, 6, 7, 8

## X6511WV-09H-C60D30
designator J?
Gold 250V 3A Policy 2.5mm 9P 260℃ -40℃~+105℃ 2.54mm Single Row Black Brass 1x9P 2.54mm Plugin,P=2.54mm Pin Headers ROHS; Manufacturer: XKB; Manufacturer Part Number: X6511WV-09H-C60D30; Item Type: Male Header; Package: Plugin,P=2.54mm; LCSC Part Number: C706881; ComponentLink1Description: LCSC; ComponentLink1URL: https://www.lcsc.com/product-detail/Pin-Headers_XKB-Connection-X6511WV-09H-C60D30_C706881.html
footprint HDR 1X9 male
pins: 1, 2, 3, 4, 5, 6, 7, 8, 9

## X6511WV-10H-C60D30
designator J?
Gold 250V 3A Policy 2.5mm 10P 260℃ -40℃~+105℃ 2.54mm Single Row Black Brass 2.54mm 1x10P Plugin,P=2.54mm Pin Headers ROHS; Manufacturer: XKB; Manufacturer Part Number: X6511WV-10H-C60D30; Item Type: Male Header; Package: Plugin,P=2.54mm; LCSC Part Number: C706882; ComponentLink1Description: LCSC; ComponentLink1URL: https://www.lcsc.com/product-detail/Pin-Headers_XKB-Connection-X6511WV-10H-C60D30_C706882.html
footprint HDR 1X10 male
pins: 1, 2, 3, 4, 5, 6, 7, 8, 9, 10

## X6511WV-11H-C60D30
designator J?
Gold 250V 3A Policy 2.5mm 11P 260℃ -40℃~+105℃ 2.54mm Single Row Black Brass 1x11P 2.54mm Plugin,P=2.54mm Pin Headers ROHS; Manufacturer: XKB; Manufacturer Part Number: X6511WV-11H-C60D30; Item Type: Male Header; Package: Plugin,P=2.54mm; LCSC Part Number: C725943; ComponentLink1Description: LCSC; ComponentLink1URL: https://www.lcsc.com/product-detail/Pin-Headers_XKB-Connection-X6511WV-11H-C60D30_C725943.html
footprint HDR 1X11 male
pins: 1, 2, 3, 4, 5, 6, 7, 8, 9, 10, 11

## X6511WV-12H-C60D30
designator J?
Gold 250V 3A Square Pins 2.5mm 12P 260℃ 6mm -40℃~+105℃ 3mm 2.54mm Plugin Black Brass 2.54mm 1x12P Plugin,P=2.54mm Pin Headers ROHS; Manufacturer: XKB; Manufacturer Part Number: X6511WV-12H-C60D30; Item Type: Male Header; Package: Plugin,P=2.54mm; LCSC Part Number: C725944; ComponentLink1Description: LCSC; ComponentLink1URL: https://www.lcsc.com/product-detail/Pin-Headers_XKB-Connection-X6511WV-12H-C60D30_C725944.html
footprint HDR 1x12 TH
pins: 1, 2, 3, 4, 5, 6, 7, 8, 9, 10, 11, 12

## X6511WV-14H-C60D30
designator J?
Gold 250V 3A Policy 2.5mm 14P 260℃ -40℃~+105℃ 2.54mm Single Row Black Brass 2.54mm 1x14P Plugin,P=2.54mm Pin Headers ROHS; Manufacturer: XKB; Manufacturer Part Number: X6511WV-14H-C60D30; Item Type: Male Header; Package: Plugin,P=2.54mm; LCSC Part Number: C725946; ComponentLink1Description: LCSC; ComponentLink1URL: https://www.lcsc.com/product-detail/Pin-Headers_XKB-Connection-X6511WV-14H-C60D30_C725946.html
footprint HDR 1x14 TH Male
pins: 1, 2, 3, 4, 5, 6, 7, 8, 9, 10, 11, 12, 13, 14

## X6511WVS-03H-C60D48R1
designator J?
Gold 250V 3A Brick nogging Square Pins 2.5mm 3P 260℃ 6mm -40℃~+105℃ 2.54mm Plugin Black Brass 1x3P SMD,P=2.54mm(交错脚) Pin Headers ROHS; Manufacturer: XKB Connectivity; Manufacturer Part Number: X6511WVS-03H-C60D48R1; Item Type: Male Header; Package: SMD,P=2.54mm; LCSC Part Number: C780061; ComponentLink1Description: LCSC; ComponentLink1URL: https://www.lcsc.com/product-detail/Pin-Headers_XKB-Connectivity-X6511WVS-03H-C60D48R1_C780061.html
footprint HDR1X3-SMD
pins: 1, 2, 3

## X6511WVS-06H-C60D48R2
designator J?
Gold 250V 3A Policy 2.5mm 6P -40℃~+105℃ 2.54mm Single Row Black Brass 2.54mm 1x6P SMD,P=2.54mm Pin Headers ROHS; Manufacturer: XKB Connectivity; Manufacturer Part Number: X6511WVS-03H-C60D48R1; Item Type: Male Header; Package: SMD,P=2.54mm; LCSC Part Number: C780061; ComponentLink1Description: LCSC; ComponentLink1URL: https://www.lcsc.com/product-detail/Pin-Headers_XKB-Connectivity-X6511WVS-03H-C60D48R1_C780061.html
footprint X6511WVS-06H-C60D48R2
pins: 1, 2, 3, 4, 5, 6

## X6521WR-2x03H-C60D30
designator J?
Gold 250V 3A Policy 2.5mm 6P -40℃~+105℃ 2.54mm Double Row Black Brass 2x3P 2.54mm Push-Pull,P=2.54mm Pin Headers ROHS; Manufacturer: XKB Connection; Manufacturer Part Number: X6521WR-2x03H-C60D30; Item Type: Male Pin Header; Package: Push-Pull,P=2.54mm; LCSC Part Number: C706884; ComponentLink1Description: LCSC; ComponentLink1URL: https://www.lcsc.com/product-detail/Pin-Headers_XKB-Connection-X6521WR-2x03H-C60D30_C706884.html
footprint HDR2X3 (R/A Male)
pins: 1, 2, 3, 4, 5, 6

## X6521WV-2x03H-C60D30
designator J?
Gold 250V 3A Policy 2.5mm 6P -40℃~+105℃ 2.54mm Double Row Black Brass 2x3P 2.54mm Plugin,P=2.54mm Pin Headers ROHS; Manufacturer: XKB; Manufacturer Part Number: X6521WV-2x03H-C60D30; Item Type: Male Pin Header; Package: Plugin,P=2.54mm; LCSC Part Number: C706893; ComponentLink1Description: LCSC; ComponentLink1URL: https://www.lcsc.com/product-detail/Pin-Headers_XKB-Connection-X6521WV-2x03H-C60D30_C706893.html
footprint X6521WV-2x03H-C60D30
pins: 1, 2, 3, 4, 5, 6

## X6521WV-2x04H-C60D30
designator J?
Gold 250V 3A Policy 2.5mm 8P -40℃~+105℃ 2.54mm Double Row Black Brass 2.54mm 2x4P Plugin,P=2.54mm Pin Headers ROHS; Manufacturer: XKB; Manufacturer Part Number: X6521WV-2x04H-C60D30; Item Type: Male Pin Header; Package: Plugin,P=2.54mm; LCSC Part Number: C706894; ComponentLink1Description: LCSC; ComponentLink1URL: https://www.lcsc.com/product-detail/Pin-Headers_XKB-Connection-X6521WV-2x04H-C60D30_C706894.html?s_z=n_X6521WV-2x04H-C60D30
footprint HDR 2X4 (2.54mm Male)
pins: 1, 2, 3, 4, 5, 6, 7, 8

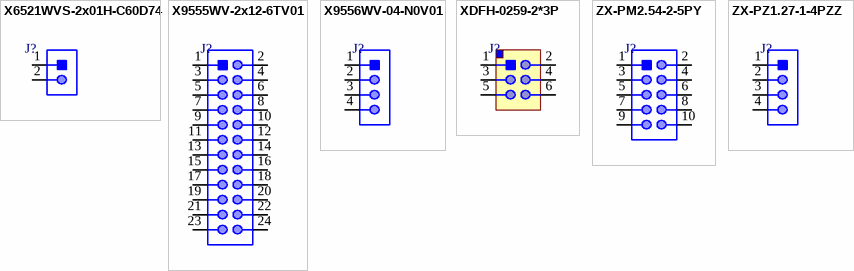
[diagram p3: symbols X6521WVS-2x01H-C60D74 to ZX-PZ1.27-1-4PZZ]

## X6521WVS-2x01H-C60D74
designator J?
Gold 250V 3A Brick nogging Square Pins 2.5mm 2P 260℃ 6mm -40℃~+105℃ 2.54mm 双排 Black Brass 2x1P SMD,P=2.54mm Pin Headers ROHS; Manufacturer: XKB Connectivity; Manufacturer Part Number: X6521WVS-2x01H-C60D74; Item Type: Connector; Package: SMD,P=2.54mm; LCSC Part Number: C2884014; ComponentLink1Description: LCSC; ComponentLink1URL: https://www.lcsc.com/product-detail/Pin-Headers_XKB-Connectivity-X6521WVS-2x01H-C60D74_C2884014.html
footprint X6521WVS-2x01H-C60D74
pins: 1, 2

## X9555WV-2x12-6TV01
designator J?
2x12P 24P 2 Tin 2.54mm 2.54mm 12 3A Brass Direct Insert Plugin,P=2.54mm Wire To Board Connector ROHS; Manufacturer: XKB Connectivity; Manufacturer Part Number: X9555WV-2x12-6TV01; Supplier: LCSC; LCSC Part Number: C692425; RoHS: No; Item Type: Wire to Board Connector; Pricing: 5=0.315, 50=0.2544, 250=0.2058, 500=0.1734, 2000=0.1589, 5000=0.1503 (USD)
footprint X9555WV-2x12-6TV01
pins: 1, 2, 3, 4, 5, 6, 7, 8, 9, 10, 11, 12, 13, 14, 15, 16, 17, 18, 19, 20, 21, 22, 23, 24

## X9556WV-04-N0V01
designator J?
1x4P 4P 1 Tin 2.54mm 4 3A Brass Direct Insert Plugin,P=2.54mm Wire To Board Connector ROHS; Manufacturer: XKB Connection; Manufacturer Part Number: X9556WV-04-N0V01; Package: Plugin,P=2.54mm; LCSC Part Number: C397403; Item Type: Wire to Board Connector; ComponentLink1Description: LCSC; ComponentLink1URL: https://www.lcsc.com/product-detail/Wire-To-Board-Connector_XKB-Connection-X9556WV-04-N0V01_C397403.html?s_z=n_X9556WV-04-N0V01
footprint X9556WV-04-N0V01
pins: 1, 2, 3, 4

## XDFH-0259-2*3P
designator J?
-45℃~+105℃ Bend-in 3A Gold Copper 500V 2x3P 3 Simple cow constellation 2.54mm 2 Push-Pull,P=2.54mm IDC Connectors ROHS; Manufacturer: Lian Xin Technology; Manufacturer Part Number: XDFH-0259-2*3P; Package: Push-Pull,P=2.54mm; LCSC Part Number: C19193818; Item Type: IDC Connector; ComponentLink1Description: LCSC; ComponentLink1URL: https://www.lcsc.com/product-detail/IDC-Connectors_Lian-Xin-Technology-XDFH-0259-2-3P_C19193818.html
footprint XDFH-0259-2*3P
pins: 1, 2, 3, 4, 5, 6

## ZX-PM2.54-2-5PY
designator J?
2.54mm 2.54mm 3A 双排 Gold bronze 1kV -40℃~+105℃ 5P 260℃@5S Straight 2x5P 8.5mm Top Square Hole Plugin,P=2.54mm Female Headers ROHS; Manufacturer: Megastar; Manufacturer Part Number: ZX-PM2.54-2-5PY; Package: Plugin,P=2.54mm; LCSC Part Number: C7499341; Item Type: Female Header; ComponentLink1Description: LCSC; ComponentLink1URL: https://www.lcsc.com/product-detail/span-style-background-color-ff0-Female-span-Headers_Megastar-ZX-PM2-54-2-5PY_C7499341.html
footprint HDR 2x5 Female Header
pins: 1, 2, 3, 4, 5, 6, 7, 8, 9, 10

## ZX-PZ1.27-1-4PZZ
designator J?
Gold 1A Straight Policy 1mm 4P 3.9mm -40℃~+105℃ 2.3mm 1.27mm Brass Black Single Row 1x4P Plugin,P=1.27mm Pin Headers ROHS; Manufacturer: Megastar; Manufacturer Part Number: ZX-PZ1.27-1-4PZZ; Item Type: Header; Package: Plugin,P=1.27mm; LCSC Part Number: C41370736; ComponentLink1Description: LCSC; ComponentLink1URL: https://www.lcsc.com/product-detail/Pin-Headers_Megastar-ZX-PZ1-27-1-4PZZ_C41370736.html
footprint ZX-PZ1.27-1-4PZZ
pins: 1, 2, 3, 4